# Altium schematic symbol library v2lib.SchLib: 26 symbols
Pins are listed as number, name and electrical type; pins without a type are passive.

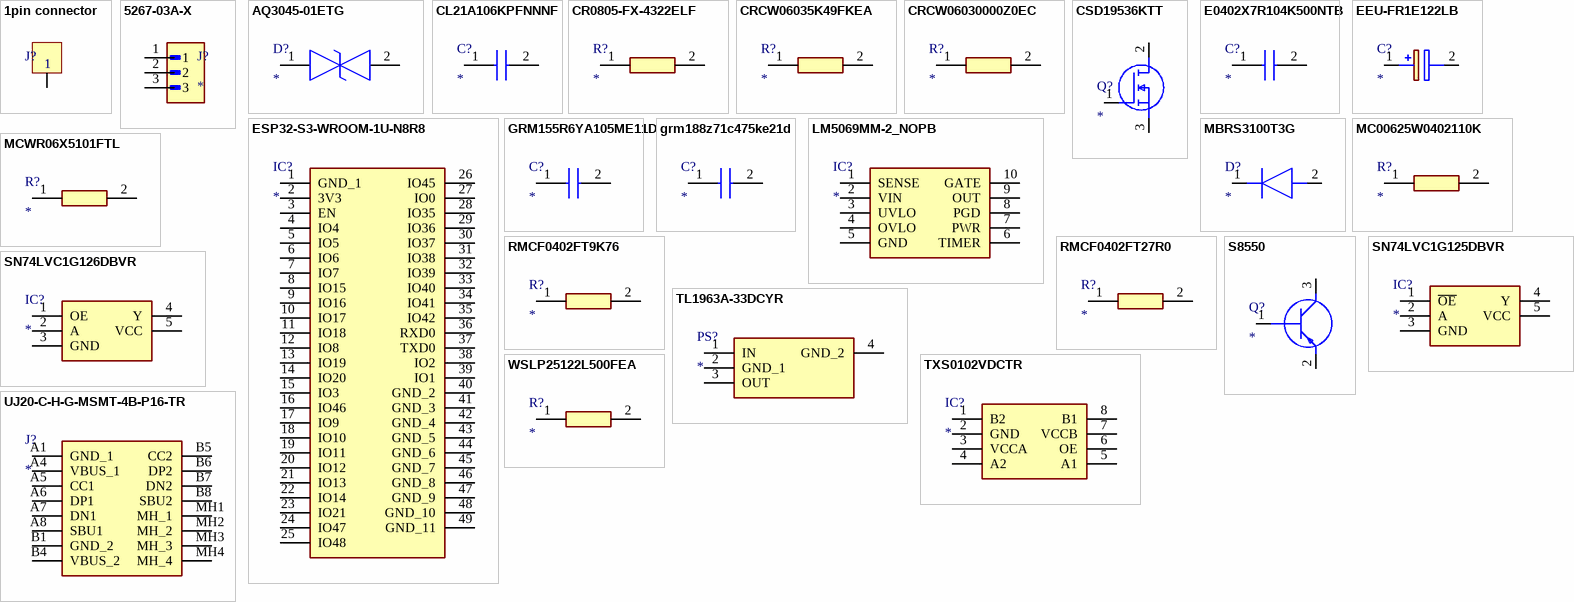
[diagram p0: symbols 1pin connector to WSLP25122L500FEA]

## 1pin connector
designator J?  (value not drawn)
Board Connector, 1 Contact(s), 1 Row(s), Female, Straight, Solder Terminal, Black Insulator, Receptacle; GPIO_Net: *
footprint 1 pin_conn
pins: 1

## 5267-03A-X
designator J?
CONN HEADER TH 3POS 2.5mm; MF: Molex; MP: 5267-03A-X; SnapEDA_Link: https://www.snapeda.com/parts/5267-03A-X/Molex/view-part/?ref=snap; Package: None; Value: *; Check_prices: https://www.snapeda.com/parts/5267-03A-X/Molex/view-part/?ref=eda
footprint MOLEX_5267-03A-X
pins: 1, 2, 3

## AQ3045-01ETG
designator D?
TVS Diode (Bi-directional); Manufacturer_Name: LITTELFUSE; Manufacturer_Part_Number: AQ3045-01ETG; Datasheet Link: http://m.littelfuse.com/~/media/electronics/datasheets/tvs_diode_arrays/littelfuse_tvs_diode_array_aq3045_datasheet.pdf.pdf; Height: 0.42mm; Mouser Part Number: 576-AQ3045-01ETG; Mouser Price/Stock: https://www.mouser.co.uk/ProductDetail/Littelfuse/AQ3045-01ETG?qs=lM4gFlnEeEMEfe%252B5jSw4OA%3D%3D; Arrow Part Number: AQ3045-01ETG; Arrow Price/Stock: https://www.arrow.com/en/products/aq3045-01etg/littelfuse.html?utm_currency=USD&region=nac
footprint AQ304501ETG
pins: 1, 2

## CL21A106KPFNNNF
designator C?
Cap Ceramic 10uF 10V X5R 10% SMD 0805 85C Embossed T/R; Manufacturer_Name: Yageo Group; Manufacturer_Part_Number: C0402C101G3GALTU; Datasheet Link: https://content.kemet.com/datasheets/KEM_C1002_X7R_SMD.pdf; Height: 0.55mm
footprint C0402C104J4RACTU
pins: 1, 2

## CR0805-FX-4322ELF
designator R?
Res Thick Film 0805 43.2K Ohm 1% 1/8W 100ppm/C Molded SMD SMD Paper Tape on Plastic Reel; Manufacturer_Name: Bourns; Manufacturer_Part_Number: CR0805-FX-4322ELF; Datasheet Link: https://www.bourns.com/pdfs/chpreztr.pdf; Height: 0.6mm; Mouser Part Number: 652-CR0805FX-4322ELF; Mouser Price/Stock: https://www.mouser.co.uk/ProductDetail/Bourns/CR0805-FX-4322ELF?qs=TYKCbaKwe1AoFj9Z1kLM%2Fw%3D%3D
footprint RESC2012X60N
pins: 1, 2

## CRCW06035K49FKEA
designator R?
Res Thick Film 0603 5.49K Ohm 1% 0.1W(1/10W) 100ppm/C Pad SMD T/R Automotive AEC-Q200; Manufacturer_Name: Vishay; Manufacturer_Part_Number: CRCW06035K49FKEA; Datasheet Link: http://www.vishay.com/docs/20035/dcrcwe3.pdf; Height: 0.5mm; Mouser Part Number: 71-CRCW0603-5.49K-E3; Mouser Price/Stock: https://www.mouser.co.uk/ProductDetail/Vishay-Dale/CRCW06035K49FKEA?qs=C0yavoHm3BmrHuoVQmHL9Q%3D%3D
footprint RESC1608X50N
pins: 1, 2

## CRCW06030000Z0EC
designator R?
Resistor; Manufacturer_Name: Vishay; Manufacturer_Part_Number: CRCW06030000Z0EC; Datasheet Link: http://www.vishay.com/docs/20035/dcrcwe3.pdf; Height: 0.5mm; Mouser Part Number: 71-CRCW06030000Z0EC; Mouser Price/Stock: https://www.mouser.co.uk/ProductDetail/Vishay-Dale/CRCW06030000Z0EC?qs=5Vo7YKalRVV5nT3RQodYAA%3D%3D; Arrow Part Number: CRCW06030000Z0EC; Arrow Price/Stock: https://www.arrow.com/en/products/crcw06030000z0ec/vishay?utm_currency=USD&region=nac
footprint RESC1608X50N
pins: 1, 2

## CSD19536KTT
designator Q?
MOSFET (N-Channel); Manufacturer_Name: Texas Instruments; Manufacturer_Part_Number: CSD19536KTT; Datasheet Link: http://www.ti.com/lit/gpn/csd19536ktt; Mouser Part Number: 595-CSD19536KTT; Mouser Price/Stock: https://www.mouser.co.uk/ProductDetail/Texas-Instruments/CSD19536KTT?qs=MiqG6Kq1qKP2NIsb3jZrDg%3D%3D; Arrow Part Number: CSD19536KTT; Arrow Price/Stock: https://www.arrow.com/en/products/csd19536ktt/texas-instruments.html?utm_currency=USD&region=nac
footprint CSD19536KTTT
pins: 1 G, 2 D, 3 S

## E0402X7R104K500NTB
designator C?
100 nF 10% 50V Ceramic Capacitor X7R 0402 (1005 Metric); Manufacturer_Name: Yageo Group; Manufacturer_Part_Number: C0402C101G3GALTU; Datasheet Link: https://content.kemet.com/datasheets/KEM_C1002_X7R_SMD.pdf; Height: 0.55mm
footprint C0402C104J4RACTU
pins: 1, 2

## EEU-FR1E122LB
designator C?
Capacitor Polarised; Manufacturer_Name: Panasonic; Manufacturer_Part_Number: EEU-FR1E122LB; Datasheet Link: http://industrial.panasonic.com/cdbs/www-data/pdf/RDF0000/ABA0000C1259.pdf; Height: 27mm; Mouser Part Number: 667-EEU-FR1E122LB; Mouser Price/Stock: https://www.mouser.com/Search/Refine.aspx?Keyword=667-EEU-FR1E122LB
footprint CAPPRD500W65D1000H2700
pins: 1 +, 2 -

## ESP32-S3-WROOM-1U-N8R8
designator IC?
Integrated Circuit; Manufacturer_Name: Espressif Systems; Manufacturer_Part_Number: ESP32-S3-WROOM-1U-N8R8; Datasheet Link: https://www.espressif.com/sites/default/files/documentation/esp32-s3-wroom-1_wroom-1u_datasheet_en.pdf; Height: 3.35mm; Mouser Part Number: 356-ESP32S3WRM1UN8R8; Mouser Price/Stock: https://www.mouser.co.uk/ProductDetail/Espressif-Systems/ESP32-S3-WROOM-1U-N8R8?qs=Li%252BoUPsLEnvOglIa3CypaQ%3D%3D
footprint ESP32S3WROOM1UN8R8
pins: 1 GND_1, 2 3V3, 3 EN, 4 IO4, 5 IO5, 6 IO6, 7 IO7, 8 IO15, 9 IO16, 10 IO17, 11 IO18, 12 IO8, 13 IO19, 14 IO20, 15 IO3, 16 IO46, 17 IO9, 18 IO10, 19 IO11, 20 IO12, 21 IO13, 22 IO14, 23 IO21, 24 IO47, 25 IO48, 26 IO45, 27 IO0, 28 IO35, 29 IO36, 30 IO37, 31 IO38, 32 IO39, 33 IO40, 34 IO41, 35 IO42, 36 RXD0, 37 TXD0, 38 IO2, 39 IO1, 40 GND_2, 41 GND_3, 42 GND_4, 43 GND_5, 44 GND_6, 45 GND_7, 46 GND_8, 47 GND_9, 48 GND_10, 49 GND_11

## GRM155R6YA105ME11D
designator C?
Capacitor; Manufacturer_Name: Murata Electronics; Manufacturer_Part_Number: GRM155R6YA105ME11D; Datasheet Link: https://search.murata.co.jp/Ceramy/image/img/A01X/G101/ENG/GRM155R6YA105ME11-01A.pdf; Height: 0.33mm; Mouser Part Number: 81-GRM155R6YA105ME1D; Mouser Price/Stock: https://www.mouser.com/Search/Refine.aspx?Keyword=81-GRM155R6YA105ME1D; Arrow Part Number: GRM155R6YA105ME11D; Arrow Price/Stock: https://www.arrow.com/en/products/grm155r6ya105me11d/murata-manufacturing
footprint GRM15x
pins: 1, 2

## grm188z71c475ke21d
designator C?
Capacitor; Manufacturer_Name: SAMSUNG; Manufacturer_Part_Number: CL10A475KO8NNNC; Datasheet Link: https://rs.componentsearchengine.com/Datasheets/2/CL10A475KO8NNNC.pdf; Height: 0.9mm; Mouser Part Number: 187-CL10A475KO8NNNC; Mouser Price/Stock: https://www.mouser.co.uk/ProductDetail/Samsung-Electro-Mechanics/CL10A475KO8NNNC?qs=X6jEic%2FHinAbIjmLnFfqqQ%3D%3D; Arrow Part Number: CL10A475KO8NNNC; Arrow Price/Stock: https://www.arrow.com/en/products/cl10a475ko8nnnc/samsung-electro-mechanics.html?utm_currency=USD&region=nac
footprint CAPC1608X90N
pins: 1, 2

## LM5069MM-2_NOPB
designator IC?
Integrated Circuit; Manufacturer_Name: Texas Instruments; Manufacturer_Part_Number: LM5069MM-2/NOPB; Datasheet Link: http://www.ti.com/lit/gpn/lm5069; Height: 1.1mm; Mouser Part Number: 926-LM5069MM-2/NOPB; Mouser Price/Stock: https://www.mouser.co.uk/ProductDetail/Texas-Instruments/LM5069MM-2-NOPB?qs=QbsRYf82W3EdgSJlau%252Bfzw%3D%3D; Arrow Part Number: LM5069MM-2/NOPB; Arrow Price/Stock: https://www.arrow.com/en/products/lm5069mm-2nopb/texas-instruments.html?utm_currency=USD&region=nac
footprint LM5069MM-2/NOPB
pins: 1 SENSE, 2 VIN, 3 UVLO, 4 OVLO, 5 GND, 6 TIMER, 7 PWR, 8 PGD, 9 OUT, 10 GATE

## MBRS3100T3G
designator D?
Diode; Manufacturer_Name: onsemi; Manufacturer_Part_Number: MBRS3100T3G; Datasheet Link: https://www.onsemi.com/pub/Collateral/MBRS3100T3-D.PDF; Height: 2.61mm; Mouser Part Number: 863-MBRS3100T3G; Mouser Price/Stock: https://www.mouser.co.uk/ProductDetail/onsemi/MBRS3100T3G?qs=3JMERSakebrbkNtjl3tdRw%3D%3D; Arrow Part Number: MBRS3100T3G; Arrow Price/Stock: https://www.arrow.com/en/products/mbrs3100t3g/on-semiconductor?utm_currency=USD&region=nac
footprint DIOM8059X261N
pins: 1 K, 2 A

## MC00625W0402110K
designator R?
Res General Purpose Thick Film 0402 10k Ohm 1% 1/16W 100ppm/C Molded; Manufacturer_Name: Multicomp Pro; Manufacturer_Part_Number: MC00625W0402110K; Datasheet Link: http://www.farnell.com/datasheets/2140393.pdf?_ga=1.247542791.1411154270.1472651675; Height: 0.4mm
footprint RESC1005X40N
pins: 1, 2

## MCWR06X5101FTL
designator R?
Res Thick Film 0603 5.1K Ohm 1% 0.1W(1/10W) 100ppm/C Pad SMD T/R; Manufacturer_Name: Multicomp Pro; Manufacturer_Part_Number: MCWR06X5101FTL; Datasheet Link: https://4donline.ihs.com/images/VipMasterIC/IC/SCMP/SCMP-S-A0009547702/SCMP-S-A0009547702-1.pdf?hkey=6D3A4C79FDBF58556ACFDE234799DDF0; Height: 0.6mm
footprint RESC1608X60N
pins: 1, 2

## RMCF0402FT9K76
designator R?
Res Thick Film 0402 9.76K Ohm 1% 0.063W 100ppm/C Molded SMD Paper T/R; Manufacturer_Name: Stackpole Electronics; Manufacturer_Part_Number: RMCF0402FT9K76; Datasheet Link: https://cs.seielect.com/catalog/SEI-RMCF_RMCP.pdf; Height: 0.4mm
footprint RESC1005X40N
pins: 1, 2

## RMCF0402FT27R0
designator R?
Res Thick Film 0402 27 Ohm 1% 0.063W(1/16W) 100ppm/C Pad SMD Automotive T/R; Manufacturer_Name: Yageo Group; Manufacturer_Part_Number: RC0402FR-0727RL; Datasheet Link: https://www.yageogroup.com/content/datasheet/asset/file/PYU-RC_GROUP_51_ROHS_L; Height: 0.4mm; Mouser Part Number: 603-RC0402FR-0727RL; Mouser Price/Stock: https://www.mouser.co.uk/ProductDetail/YAGEO/RC0402FR-0727RL?qs=UOUeRUa%252B8Wlb37UyFHw9Bw%3D%3D; Arrow Part Number: RC0402FR-0727RL; Arrow Price/Stock: https://www.arrow.com/en/products/rc0402fr-0727rl/yageo.html?utm_currency=USD&region=nac
footprint RESC1005X40N
pins: 1, 2

## S8550
designator Q?
Transistor BJT PNP; Manufacturer_Name: Galaxy; Manufacturer_Part_Number: S8550; Datasheet Link: https://datasheet.datasheetarchive.com/originals/distributors/Datasheets-3/DSA-49109.pdf; Height: 1.1mm
footprint SOT95P240X110-3N
pins: 1 B, 2 E, 3 C

## SN74LVC1G125DBVR
designator IC?
Integrated Circuit; Manufacturer_Name: Texas Instruments; Manufacturer_Part_Number: SN74LVC1G125DBVR; Datasheet Link: http://www.ti.com/lit/ds/symlink/sn74lvc1g125.pdf; Height: 1.45mm; Mouser Part Number: 595-SN74LVC1G125DBVR; Mouser Price/Stock: https://www.mouser.co.uk/ProductDetail/Texas-Instruments/SN74LVC1G125DBVR?qs=dT9u2OTAaVWCjkJK89JQQg%3D%3D; Arrow Part Number: SN74LVC1G125DBVR; Arrow Price/Stock: https://www.arrow.com/en/products/sn74lvc1g125dbvr/texas-instruments.html?utm_currency=USD&region=asia
footprint SOT95P280X145-5N
pins: 1 ~{OE}, 2 A, 3 GND, 4 Y, 5 VCC

## SN74LVC1G126DBVR
designator IC?
Integrated Circuit; Manufacturer_Name: Texas Instruments; Manufacturer_Part_Number: SN74LVC1G126DBVR; Datasheet Link: http://www.ti.com/lit/ds/symlink/sn74lvc1g126.pdf; Height: 1.45mm; Mouser Part Number: 595-SN74LVC1G126DBVR; Mouser Price/Stock: https://www.mouser.co.uk/ProductDetail/Texas-Instruments/SN74LVC1G126DBVR?qs=pajgIaoyDUi3T2WgNNfd3w%3D%3D; Arrow Part Number: SN74LVC1G126DBVR; Arrow Price/Stock: https://www.arrow.com/en/products/sn74lvc1g126dbvr/texas-instruments.html?utm_currency=USD&region=nac
footprint SOT95P280X145-5N
pins: 1 OE, 2 A, 3 GND, 4 Y, 5 VCC

## TL1963A-33DCYR
designator PS?
Power Supply; Manufacturer_Name: Texas Instruments; Manufacturer_Part_Number: TL1963A-33DCYR; Datasheet Link: http://www.ti.com/lit/gpn/tl1963a; Height: 1.8mm; Mouser Part Number: 595-TL1963A-33DCYR; Mouser Price/Stock: https://www.mouser.co.uk/ProductDetail/Texas-Instruments/TL1963A-33DCYR?qs=IK5e5L0zOXhRu%2FNTAfJNEA%3D%3D; Arrow Part Number: TL1963A-33DCYR; Arrow Price/Stock: https://www.arrow.com/en/products/tl1963a-33dcyr/texas-instruments?utm_currency=USD&region=nac
footprint TL1963A-33DCYR
pins: 1 IN, 2 GND_1, 3 OUT, 4 GND_2

## TXS0102VDCTR
designator IC?
Integrated Circuit; Manufacturer_Name: Texas Instruments; Manufacturer_Part_Number: TXS0102VDCTR; Datasheet Link: https://www.ti.com/lit/ds/symlink/txs0102v.pdf?ts=1736527127556&ref_url=https%253A%252F%252Fwww.ti.com%252Flogic-voltage-translation%252Fvoltage-translators-level-shifters%252Fproducts.html; Height: 1.3mm; Mouser Part Number: 595-TXS0102VDCTR; Mouser Price/Stock: https://www.mouser.co.uk/ProductDetail/Texas-Instruments/TXS0102VDCTR?qs=olJun0bQHM%2FUS3bAIjbB0A%3D%3D; Arrow Part Number: TXS0102VDCTR; Arrow Price/Stock: https://www.arrow.com/en/products/txs0102vdctr/texas-instruments?utm_currency=USD&region=nac
footprint SOP65P400X130-8N
pins: 1 B2, 2 GND, 3 VCCA, 4 A2, 5 A1, 6 OE, 7 VCCB, 8 B1

## UJ20-C-H-G-MSMT-4B-P16-TR
designator J?
Connector; Manufacturer_Name: Same Sky; Manufacturer_Part_Number: UJ20-C-H-G-MSMT-4B-P16-TR; Datasheet Link: https://www.sameskydevices.com/product/resource/uj20-c-h-g-msmt-4b-p16-tr.pdf; Height: 2.6mm
footprint UJ20CHGMSMT4BP16TR
pins: A1 GND_1, A4 VBUS_1, A5 CC1, A6 DP1, A7 DN1, A8 SBU1, B1 GND_2, B4 VBUS_2, B5 CC2, B6 DP2, B7 DN2, B8 SBU2, MH1 MH_1, MH2 MH_2, MH3 MH_3, MH4 MH_4

## WSLP25122L500FEA
designator R?
Fixed Resistor, Metal Strip, 3W, 0.0025ohm, 0.0866V, 1% +/-Tol, 275ppm/Cel, Surface Mount, 2512; Manufacturer_Name: Vishay; Manufacturer_Part_Number: WSLP25122L500FEA; Datasheet Link: https://componentsearchengine.com/Datasheets/1/WSLP25122L500FEA.pdf; Height: 0.889mm; Mouser Part Number: 71-WSLP25122L500FEA; Mouser Price/Stock: https://www.mouser.co.uk/ProductDetail/Vishay-Dale/WSLP25122L500FEA?qs=%2FCXICPRLKg%252BpcyljWM%2FHhA%3D%3D; Arrow Part Number: WSLP25122L500FEA; Arrow Price/Stock: https://www.arrow.com/en/products/wslp25122l500fea/vishay?utm_currency=USD&region=nac
footprint RESC6432X89N
pins: 1, 2